# Altium footprint library Diode$.PcbLib: 98 footprints (part 6 of 7)
Each footprint in its own frame and in the unit in brackets; x right, y up, seen from the top. Pads: shape width x height; smd on the part's side, far side on the other; paste and mask are expansions set on the pad; w line width, h text height; cw(c..) or ccw(c..) is an arc to the next point about the centre after c.
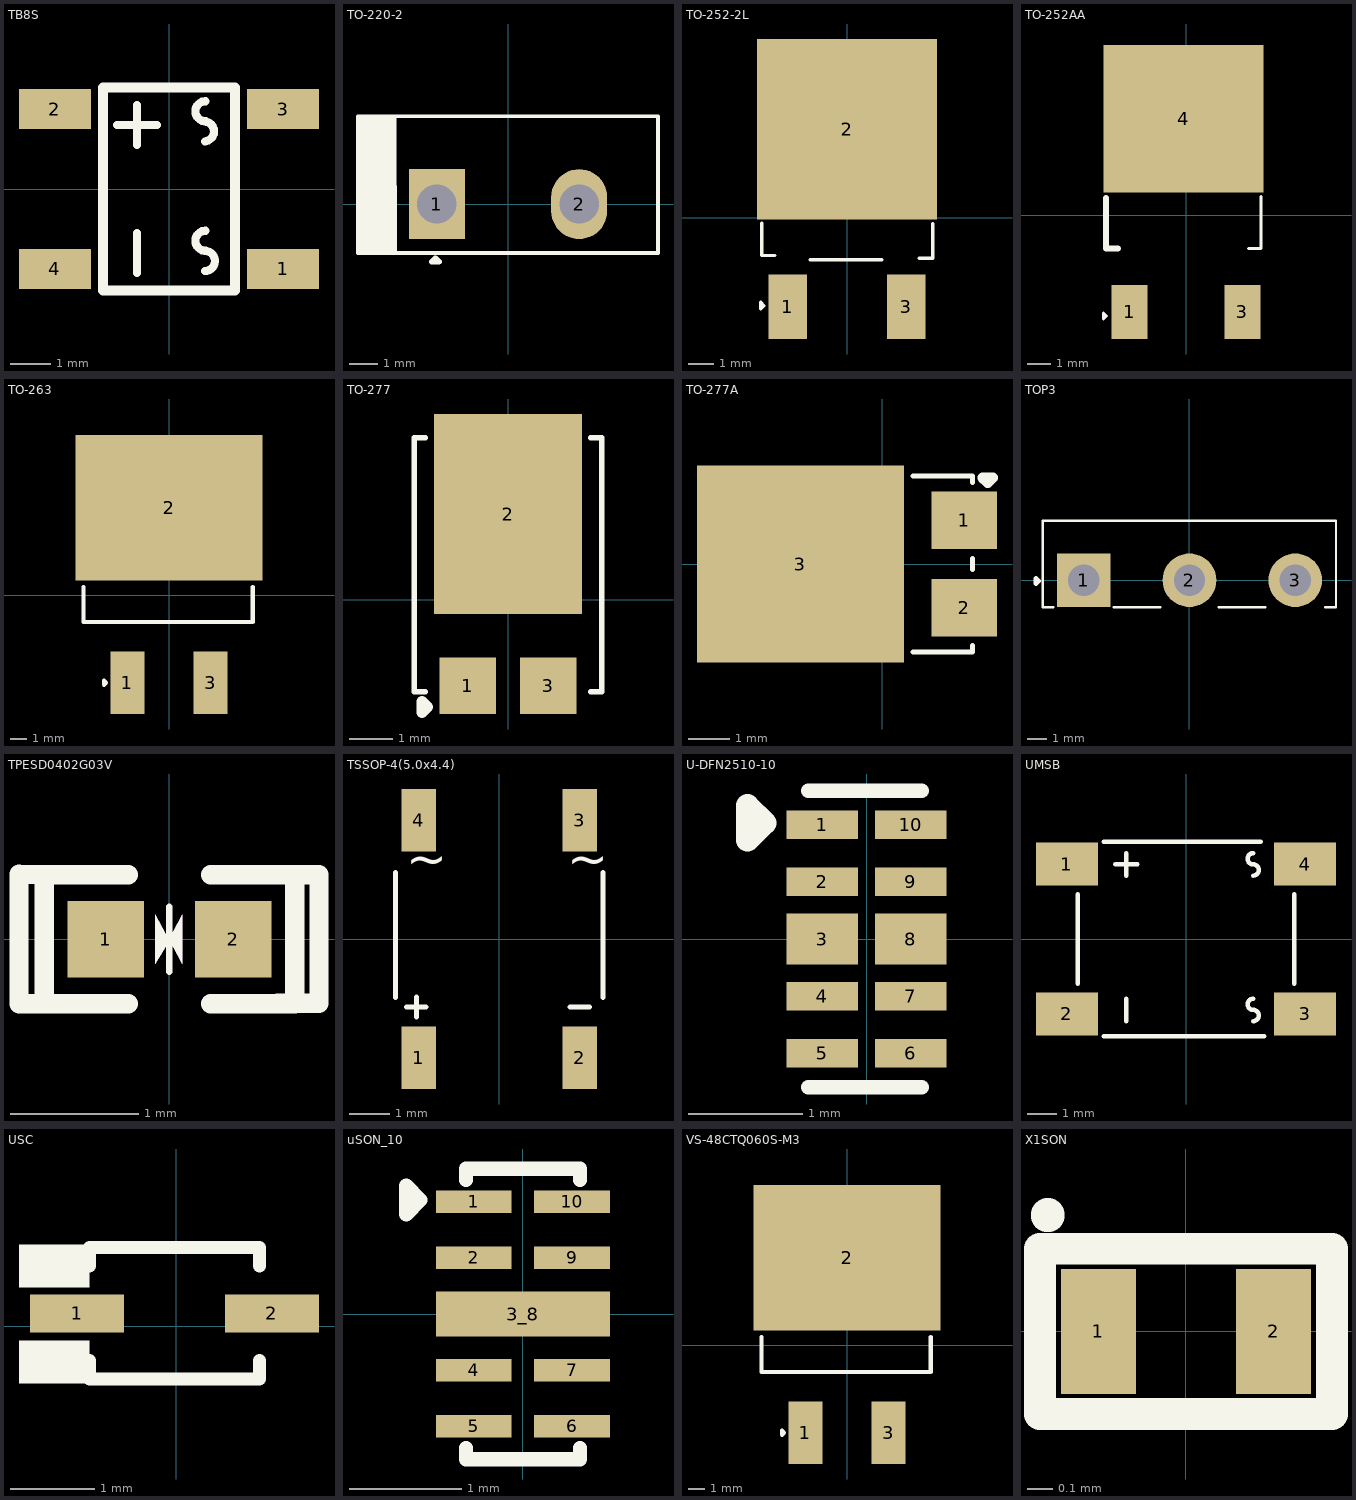
[diagram p5: the footprints below, top view; thin cyan lines are the x and y axes]

## TB8S [mm]
pads (4):
  rect 1.8x1 smd paste+0 mask+0.051: 1(2.85,-2) 2(-2.85,2) 3(2.85,2) 4(-2.85,-2)
Top Overlay:
  lines w0.203: -1.3,1.6 -0.3,1.6 ; -0.8,-2.1 -0.8,-1.1 ; -0.8,1.1 -0.8,2.1 ; 0.899,-2.05 ccw(c0.899,-1.8) 0.899,-1.549 ; 0.899,1.191 ccw(c0.876,1.44) 0.899,1.689 ; 0.909,-1.544 cw(c0.909,-1.294) 0.909,-1.044 ; 0.909,1.694 cw(c0.909,1.944) 0.909,2.195
  lines w0.254: -1.651,-2.54 1.651,-2.54 1.651,2.54 -1.651,2.54 -1.651,-2.54
3D body "TB8S.STEP": height 1.4, standoff 0, extent -3.25,-2.497 3.25,2.498

## TO-220-2 [mm]
pads (2):
  rect 2x2.5 hole 1.4 paste-2539.97 mask+0.051: 1(-2.54,0)
  oval 2x2.5 hole 1.4 paste-2539.97 mask+0.051: 2(2.54,0)
Top Overlay:
  rectangle: -5.354,-1.746 -3.962,0.661
  rectangle: -5.354,0.381 -3.971,3.135
  lines w0.127: 5.354,-1.746 -5.353,-1.746 -5.354,-1.745 -5.354,3.135 5.354,3.135 5.354,-1.745
  lines w0.2: -2.718,-2.057 -2.591,-1.93 -2.464,-2.057 -2.718,-2.057
3D body "C77956.step": height 22.95, standoff -8.29, extent -5.335,-1.71 5.335,3.1

## TO-252-2L [mm]
pads (3):
  rect 1.5x2.5 smd: 1(-2.3,-3.45) 3(2.3,-3.45)
  rect 7x7 smd: 2(0,3.45)
Top Overlay:
  lines w0.127: -3.308,-0.203 -3.308,-1.457 -2.794,-1.457 ; -1.422,-1.626 1.346,-1.626 ; 2.794,-1.563 3.329,-1.563 3.329,-0.227 ; -3.353,-3.531 -3.353,-3.277 -3.226,-3.404 -3.353,-3.531
3D body "User Library-DPAK-1.STEP": height 2.34, standoff -0.07, extent -3.27,-4.311 3.27,5.627

## TO-252AA [mm]
pads (3):
  rect 1.524x2.28 smd: 1(-2.38,-4.072) 3(2.38,-4.072)
  rect 6.74x6.23 smd: 4(-0.1,4.073)
Top Overlay:
  lines w0.127: 2.629,-1.397 3.17,-1.397 3.17,0.79 ; -3.48,-4.369 -3.48,-4.115 -3.353,-4.242 -3.48,-4.369
  lines w0.254: -3.37,0.73 -3.37,-1.397 -2.87,-1.397
3D body "User Library-DPAK-1.STEP": height 2.39, standoff -0.02, extent -3.37,-4.312 3.17,5.626

## TO-263 [mm]
pads (3):
  rect 2.08x3.81 smd: 1(-2.54,-5.335) 3(2.54,-5.335)
  rect 11.43x8.89 smd: 2(0,5.335)
Top Overlay:
  lines w0.254: -5.207,0.508 -5.207,-1.626 5.105,-1.626 5.105,0.508 ; -3.962,-5.461 -3.835,-5.334 -3.962,-5.207 -3.962,-5.461
3D body "pwr263s-35-8r20f.stp": height 4.5, standoff 0, extent -5.075,-6.596 5.025,8.794

## TO-277 [mm]
pads (3):
  rect 1.3x1.3 smd: 1(-0.93,-1.975) 3(0.93,-1.975)
  rect 3.4x4.6 smd: 2(0,1.975)
Top Overlay:
  lines w0.127: -1.905,-2.108 -2.159,-2.108 -2.159,3.734 -1.905,3.734 ; 1.905,-2.108 2.159,-2.108 2.159,3.734 1.905,3.734
  lines w0.254: -1.981,-2.591 -1.981,-2.337 -1.854,-2.464 -1.981,-2.591
3D body "User Library-User Library-TO-277.step": height 1.2, standoff 0, extent -2.1,-2.387 2.1,4.063

## TO-277A [mm]
pads (3):
  rect 1.6x1.4 smd paste+0 mask+0.05: 1(2,1.065) 2(2,-1.065)
  rect 5.05x4.8 smd paste+0 mask+0.05: 3(-2,0)
Top Overlay:
  lines w0.127: 0.756,-2.15 2.2,-2.15 2.2,-1.996 ; 0.756,2.15 2.2,2.15 2.2,1.996 ; 2.2,-0.134 2.2,0.134
  lines w0.254: 2.445,2.108 2.572,1.981 2.699,2.108 2.445,2.108
3D body "C241918.step": height 1.12, standoff 0, extent -4.1,-2.3 2.4,2.3

## TOP3 [mm]
pads (3):
  rect 2.8x2.8 hole 1.63: 1(-5.525,0)
  round 2.8 hole 1.63: 2(0,0) 3(5.525,0)
Top Overlay:
  lines w0.127: -7.1,-1.4 -7.65,-1.4 -7.65,3.1 7.65,3.1 7.65,-1.4 7.1,-1.4 ; -3.95,-1.4 -1.536,-1.4 ; 1.536,-1.4 3.95,-1.4
  lines w0.254: -8.014,-0.165 -8.014,0.089 -7.887,-0.038 -8.014,-0.165
3D body "step_temp.STEP": height 21.1, standoff -15.6, extent -7.65,-1.4 7.65,3.1

## TPESD0402G03V [mm]
pads (2):
  rect 0.6x0.6 smd paste-100 mask+0.051: 1(-0.5,0) 2(0.5,0)
Top Overlay:
  region: 0,0 0.1,0.19 0.1,-0.19
  region: 0,-0.01 -0.11,-0.19 -0.11,-0.01 -0.11,0.19
  lines w0.051: 0,-0.254 0,0.254
  lines w0.152: -1.17,-0.504 -0.981,-0.504 ; -0.975,-0.504 -1.178,-0.504 -1.178,0.508 -0.981,0.504 ; -0.324,0.504 -0.981,0.504 ; 0.324,-0.504 0.981,-0.504 0.981,0.504 ; 0.324,0.504 0.981,0.504 ; 0.847,-0.5 1.17,-0.5 1.17,0.504 0.981,0.504 ; -0.981,-0.504 -0.981,0.504 ; -0.981,-0.504 -0.324,-0.504 -0.981,-0.504 ; -0.981,-0.504 -0.981,0.504
Top Paste:
  region: 0.78,0.225 0.78,-0.225 0.73,-0.275 0.25,-0.275 0.18,-0.225 0.18,0.225 0.25,0.275 0.73,0.275
  region: -0.18,0.225 -0.18,-0.225 -0.25,-0.275 -0.73,-0.275 -0.78,-0.225 -0.78,0.225 -0.73,0.275 -0.25,0.275
Mechanical 15:
  region: 0,0 0.1,0.19 0.1,-0.19
  region: 0,-0.01 -0.11,-0.19 -0.11,-0.01 -0.11,0.19
3D body "TPESD0402G03V.STEP": height 0.35, standoff 0, extent -0.5,-0.25 0.5,0.25

## TSSOP-4(5.0x4.4) [mm]
pads (4):
  rect 0.85x1.55 smd: 1(-2,-2.95) 2(2,-2.95) 3(2,2.95) 4(-2,2.95)
Top Overlay:
  lines w0.127: -2.576,-1.448 -2.576,1.651 ; -2.299,-1.689 -1.816,-1.689 ; -2.057,-1.93 -2.057,-1.448 ; 1.759,-1.689 2.241,-1.689 ; 2.576,-1.448 2.576,1.651
  text "~" at 1.689,1.279 h1.52
  text "~" at -2.311,1.279 h1.52
3D body "MDB6S.STEP": height 1.4, standoff 0, extent -2.5,-3.25 2.5,3.25

## U-DFN2510-10 [mm]
pads (10):
  rect 0.625x0.25 smd: 1(-0.387,1) 2(-0.387,0.5) 4(-0.387,-0.5) 5(-0.387,-1) 6(0.387,-1) 7(0.387,-0.5) 9(0.387,0.5) 10(0.387,1)
  rect 0.625x0.45 smd: 3(-0.387,0) 8(0.387,0)
Top Overlay:
  lines w0.127: -0.508,-1.295 0.483,-1.295 ; -0.508,1.295 0.483,1.295
  lines w0.2: -1.041,0.864 -1.041,1.168 -0.889,1.016 -1.041,0.864
3D body "DFN2510-10_STP.stp": height 0.57, standoff -0.01, extent -0.5,-1.25 0.5,1.25

## UMSB [mm]
pads (4):
  rect 2.105x1.47 smd: 1(-4.052,2.55) 2(-4.052,-2.55) 3(4.052,-2.55) 4(4.052,2.55)
Top Overlay:
  lines w0.152: -3.683,-1.524 -3.683,1.524 ; -2.794,-3.302 2.667,-3.302 ; -2.794,3.302 2.54,3.302 ; -2.413,2.54 -1.651,2.54 ; -2.032,-2.794 -2.032,-2.032 ; -2.032,2.159 -2.032,2.921 ; 2.286,-2.794 ccw(c2.286,-2.604) 2.286,-2.413 cw(c2.286,-2.223) 2.286,-2.032 ; 2.286,2.159 ccw(c2.286,2.349) 2.286,2.54 cw(c2.286,2.73) 2.286,2.921 ; 3.683,-1.524 3.683,1.524
3D body "C2985033.step": height 1.4, standoff 0, extent -4.325,-3.3 4.325,3.3

## USC [mil]
pads (2):
  rect 43.75x17.75 smd: 1(-46,6) 2(44.55,6)
Top Overlay:
  rectangle: -73,18 -40.17,38
  rectangle: -73,-26.59 -40.17,-6.59
  lines w6: -40.17,-15.97 -40.17,-24.59 38.72,-24.59 38.72,-15.97 ; -40.17,27.97 -40.17,36.59 38.72,36.59 38.72,27.97
3D body "USC_TOS.step": height 43.43, standoff 0, extent -53.87,-19.59 52.43,31.59

## uSON_10 [mm]
pads (9):
  rect 0.675x0.2 smd: 1(-0.437,1) 2(-0.437,0.5) 4(-0.437,-0.5) 5(-0.437,-1) 6(0.437,-1) 7(0.437,-0.5) 9(0.437,0.5) 10(0.437,1)
  rect 1.55x0.4 smd: 3_8(0,0)
Top Overlay:
  lines w0.127: -0.508,-1.194 -0.508,-1.295 0.508,-1.295 0.508,-1.194 ; -0.508,1.194 -0.508,1.295 0.508,1.295 0.508,1.194 ; -1.041,0.889 -1.041,1.143 -0.914,1.016 -1.041,0.889
3D body "TPD4E05U06DQAR--3DModel-STEP-56544.STEP": height 0.55, standoff 0, extent -0.5,-1.25 0.5,1.25

## VS-48CTQ060S-M3 [mm]
pads (3):
  rect 2.08x3.81 smd: 1(-2.54,-5.335) 3(2.54,-5.335)
  rect 11.43x8.89 smd: 2(0,5.335)
Top Overlay:
  lines w0.254: -5.207,0.508 -5.207,-1.626 5.105,-1.626 5.105,0.508 ; -3.962,-5.461 -3.962,-5.207 -3.835,-5.334 -3.962,-5.461
3D body "pwr263s-35-8r20f.stp": height 4.5, standoff 0, extent -5.075,-6.596 5.025,8.794

## X1SON [mm] "TVS 6A@80/20µs 14V 6V 5.5V@(MAX)"
pads (2):
  rect 0.3x0.5 smd: 1(-0.35,0) 2(0.35,0)
Top Overlay:
  circle w0.127: c-0.553,0.465 r0.004
  lines w0.127: -0.584,-0.33 0.584,-0.33 0.584,0.33 -0.584,0.33 -0.584,-0.33
3D body "TPD1E10B06DPYR.STEP": height 0.45, standoff 0, extent -0.5,-0.3 0.5,0.3